# Altium footprint library PBL - THD Packages.PcbLib: 160 footprints (part 3 of 10)
Each footprint in its own frame and in the unit in brackets; x right, y up, seen from the top. Pads: shape width x height; smd on the part's side, far side on the other; paste and mask are expansions set on the pad; w line width, h text height; cw(c..) or ccw(c..) is an arc to the next point about the centre after c.
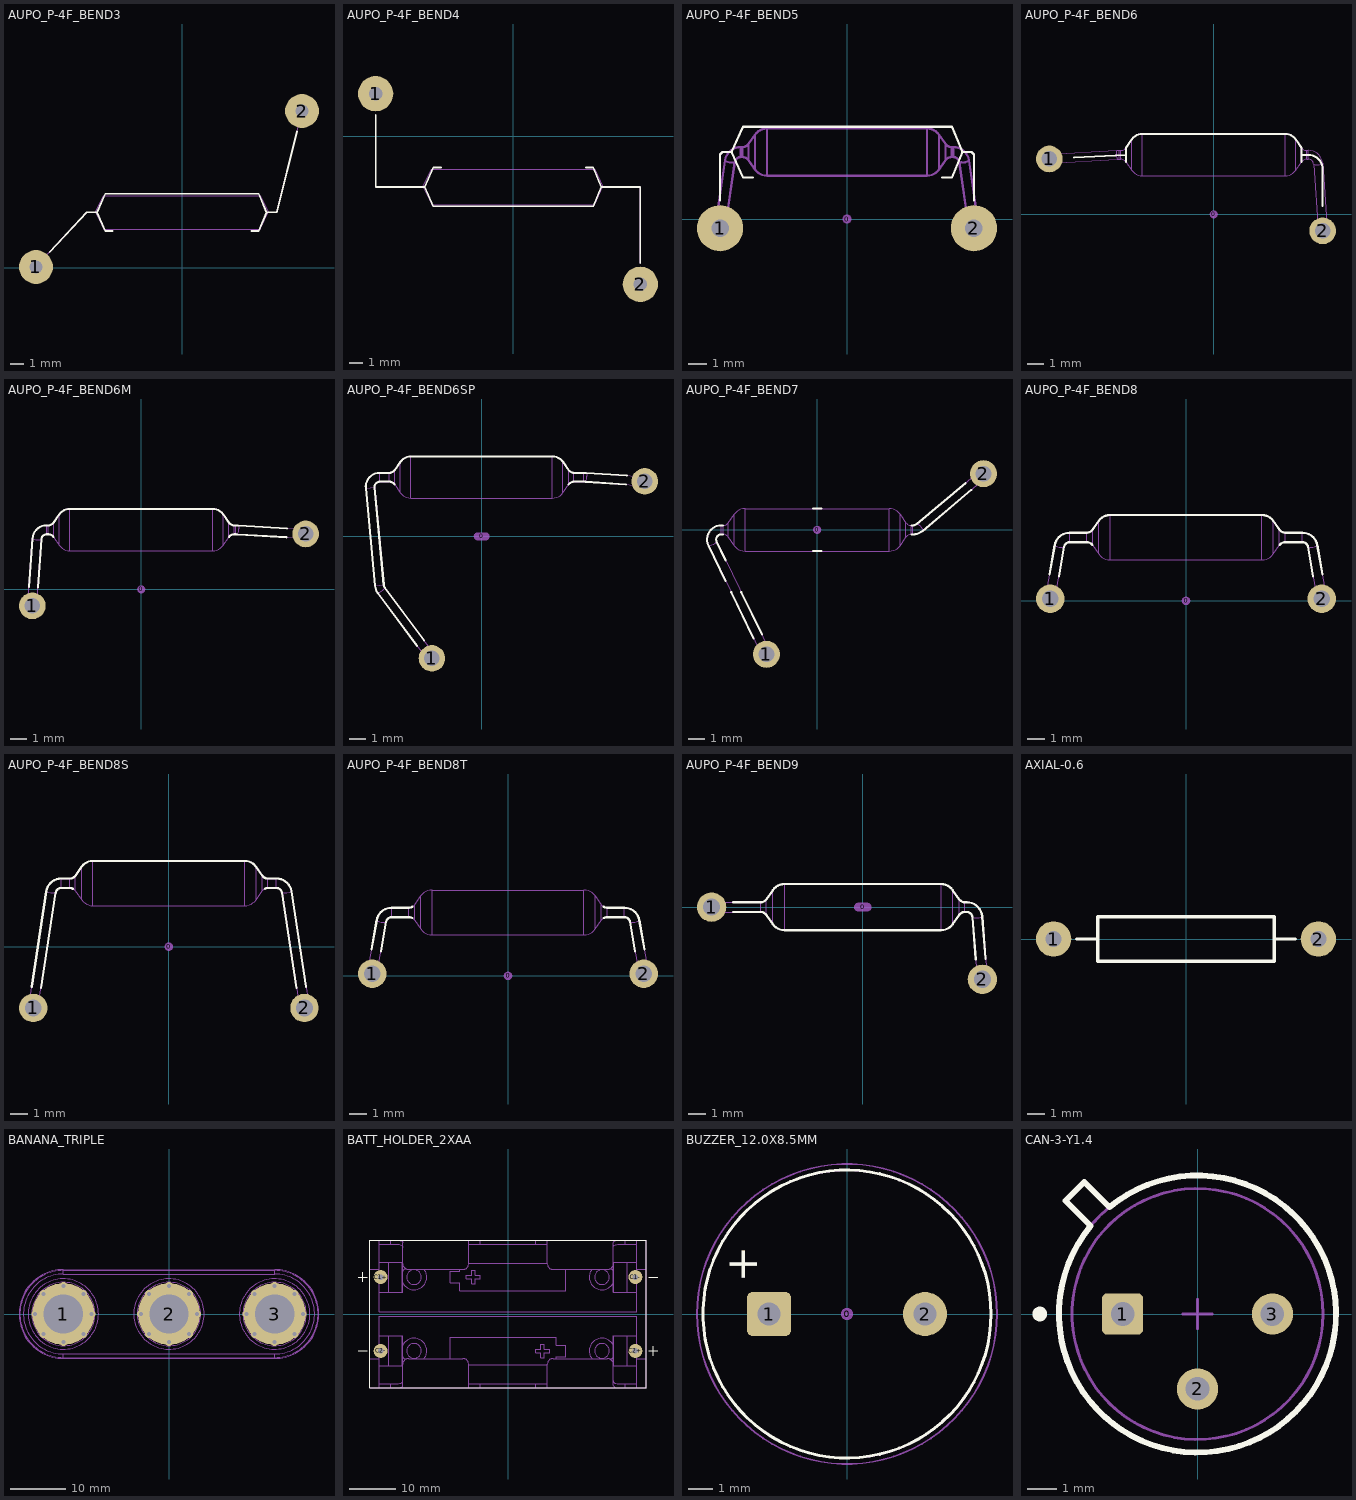
[diagram p2: the footprints below, top view; thin cyan lines are the x and y axes]

## AUPO_P-4F_BEND3 [mil] "Aupo P-4F TCO for positioning on IC legs"
height 100
pads (2):
  round 100 hole 38: 1(-431,3) 2(354,463)
Top Overlay:
  lines w5: -389.97,47.04 -281,164 -251,164 ; -205,109 -226.33,109 -251,164 ; 205,109 226.41,109 249,164 ; 338.95,403.01 279,164 249,164 ; -251,164 -226.38,219 226.38,219 249,164
13 - 3D Top Side:
  lines w3: -431,3 -280.63,164.37 -256,164.37 -231.3,213.8 231.3,213.8 254,164.37 278.63,164.37 354,463 ; -256,163.9 -231.3,114 231.3,114 254,163.9
3D body: height 105.02, standoff -94.88, extent -440.35,-6.96 364.65,473.01

## AUPO_P-4F_BEND4 [mil] "Aupo P-4F TCO for positioning on IC legs"
height 100
pads (2):
  round 100 hole 38: 1(-390,120) 2(360,-420)
Top Overlay:
  lines w5: -390,60 -390,-144 -251,-144 ; -226.38,-199 226.38,-199 249,-144 ; -226.38,-89 -251,-144 ; -226.33,-199 -251,-144 ; -226.33,-89 -205,-89 ; 205,-89 226.41,-89 249,-144 ; 360,-360 360,-144 249,-144
13 - 3D Top Side:
  lines w3: -390,60 -390,-144 -256,-144 ; -256,-144.1 -231.3,-194 231.3,-194 254,-144.1 ; -256,-143.63 -231.3,-94.2 231.3,-94.2 254,-143.63 ; 254,-144 360,-144 360,-360
3D body: height 105.02, standoff -94.88, extent -399.95,-430.6 369.97,129.36

## AUPO_P-4F_BEND5 [mil] "Aupo P-4F TCO for positioning on IC legs"
height 100
pads (3):
  round 19.68 on Mech15: 0(0,0)
  round 100 hole 38: 1(-275,-20) 2(275,-20)
Top Overlay:
  lines w5: -275,40 -275,140 -270,145 -250,145 ; -204,90 -225.33,90 -250,145 ; 206,90 227.41,90 250,145 ; 275,40 275,140 270,145 250,145 ; -250,145 -225.38,200 227.38,200 250,145
13 - 3D Top Side:
  lines w5: -282.92,0.59 ccw(c-269.19,19.56) -261.5,-2.55 ; 261.5,-2.55 ccw(c268.97,22.97) 282.85,0.28 282.92,0.59 ; -264.41,126.68 ccw(c-250.67,145.69) -242.98,123.53 ; -264.41,126.68 cw(c-230.49,121.52) -230.32,155.83 ; -264.41,126.68 -285.71,-18.43 ccw(c-275,-20) -264.29,-21.57 -242.98,123.54 ; -242.98,123.54 cw(c-230.48,121.51) -230.32,134.17 ; -230.32,134.17 -230.32,155.83 ; -230.32,134.17 -226.38,134.17 ; -230.32,155.83 -226.38,155.83 ; -226.38,134.17 cw(c-226.38,118.43) -213.48,127.46 ; -226.38,134.17 -226.38,155.83 ; -226.38,155.83 ccw(c-226.38,171.57) -213.48,162.54 ; -213.48,127.46 -213.48,162.54 ; -213.48,127.46 -199.33,107.25 ; -213.48,162.54 -199.33,182.75 ; -199.33,107.25 ccw(c-173.53,125.31) -173.53,93.82 ; -199.33,107.25 -199.33,182.75 ; -199.33,182.75 cw(c-173.53,164.69) -173.53,196.18 ; -173.53,93.82 -173.53,196.18 ; -173.53,93.82 173.53,93.82 ; -173.53,196.18 173.53,196.18 ; 173.53,93.82 ccw(c173.53,125.31) 199.33,107.25 ; 173.53,93.82 173.53,196.18 ; 173.53,196.18 cw(c173.53,164.69) 199.33,182.75 ; 199.33,107.25 199.33,182.75 ; 199.33,107.25 213.48,127.46 ; 199.33,182.75 213.48,162.54 ; 213.48,127.46 cw(c226.38,118.43) 226.38,134.17 ; 213.48,127.46 213.48,162.54 ; 213.48,162.54 ccw(c226.38,171.57) 226.38,155.83 ; 226.38,134.17 226.38,155.83 ; 226.38,134.17 230.32,134.17 ; 226.38,155.83 230.32,155.83 ; 230.32,134.17 cw(c230.48,121.51) 242.98,123.54 ; 230.32,134.17 230.32,155.83 ; 230.32,155.83 cw(c230.49,121.51) 264.41,126.68 ; 242.98,123.54 ccw(c250.45,149.1) 264.34,126.38 264.41,126.68 ; 242.98,123.54 264.29,-21.57 ccw(c275,-20) 285.83,-20 285.71,-18.43 264.41,126.68
3D body: height 102.36, standoff -100, extent -285.73,-30.8 285.83,196.09

## AUPO_P-4F_BEND6 [mil] "Aupo P-4F TCO for positioning on IC legs"
height 100
pads (3):
  round 19.68 on Mech15: 0(0,0)
  round 65 / inner round 65 / far side round 90 hole 38: 1(-400,135) 2(265,-40)
Top Overlay:
  lines w5: -340.17,138.21 -213.48,145 ; -213.48,127.46 -213.48,162.54 -199.33,182.75 cw(c-173.53,164.69) -173.53,196.18 173.53,196.18 cw(c173.53,164.69) 199.33,182.75 213.48,162.54 213.48,127.46 ; 213.48,145 230,145 cw(c230,110) 265,110 265,20
13 - 3D Top Side:
  lines w1.97: -381.43,146.96 ccw(c-359.97,137.39) -380.14,125.34 ; 252.86,-21.08 ccw(c262.11,4.31) 274.45,-19.73 274.46,-19.61 ; -235.55,155.67 ccw(c-214.1,146.11) -234.26,134.06 ; -235.55,155.67 -400.65,145.81 ccw(c-400,135) -399.35,124.19 -234.26,134.06 ; -235.55,155.67 -232.3,155.8 -230.32,155.83 ; -234.26,134.06 -232.78,134.13 -230.32,134.17 ; -230.32,134.17 -230.32,155.83 ; -230.32,134.17 -226.38,134.17 ; -230.32,155.83 -226.38,155.83 ; -226.38,134.17 cw(c-226.38,118.43) -213.48,127.46 ; -226.38,134.17 -226.38,155.83 ; -226.38,155.83 ccw(c-226.38,171.57) -213.48,162.54 ; -213.48,127.46 -199.33,107.25 ; -213.48,127.46 -213.48,162.54 ; -213.48,162.54 -199.33,182.75 ; -199.33,107.25 ccw(c-173.53,125.31) -173.53,93.82 ; -199.33,107.25 -199.33,182.75 ; -199.33,182.75 cw(c-173.53,164.69) -173.53,196.18 ; -173.53,93.82 -173.53,196.18 ; -173.53,93.82 173.53,93.82 ; -173.53,196.18 173.53,196.18 ; 173.53,93.82 ccw(c173.53,125.31) 199.33,107.25 ; 173.53,93.82 173.53,196.18 ; 173.53,196.18 cw(c173.53,164.69) 199.33,182.75 ; 199.33,107.25 199.33,182.75 ; 199.33,107.25 213.48,127.46 ; 199.33,182.75 213.48,162.54 ; 213.48,127.46 cw(c226.38,118.43) 226.38,134.17 ; 213.48,127.46 213.48,162.54 ; 213.48,162.54 ccw(c226.38,171.57) 226.38,155.83 ; 226.38,134.17 226.38,155.83 ; 226.38,134.17 230.32,134.17 ; 226.38,155.83 230.32,155.83 ; 230.32,134.17 cw(c230.47,121.52) 243.08,122.53 ; 230.32,134.17 230.32,155.83 ; 230.32,155.83 cw(c230.46,121.51) 264.69,124 ; 243.08,122.53 ccw(c252.33,147.93) 264.67,123.88 264.69,124 ; 243.08,122.53 254.2,-40.74 ccw(c265,-40) 275.83,-40 275.8,-39.26 264.69,124
3D body: height 40, standoff 0, extent -445,90.09 -355.36,179.91
3D body: height 102.87, standoff -99.49, extent -410.74,-50.8 275.83,196.09
3D body: height 40, standoff 0, extent 219.99,-84.91 309.64,4.91

## AUPO_P-4F_BEND6M [mil] "Aupo P-4F TCO for positioning on IC legs"
height 100
pads (3):
  round 19.68 on Mech15: 0(0,0)
  round 65 / inner round 65 / far side round 90 hole 38: 1(-265,-40) 2(400,135)
Top Overlay:
  lines w5: -272.66,6.54 -264.69,124.01 cw(c-230.48,121.53) -230.32,155.83 -226.38,155.83 ccw(c-226.38,171.57) -213.48,162.54 -199.33,182.75 cw(c-173.53,164.69) -173.53,196.18 173.53,196.18 cw(c173.53,164.69) 199.33,182.75 213.48,162.54 ccw(c226.38,171.57) 226.38,155.83 230.32,155.83 233.67,155.76 235.64,155.67 354.91,148.54 ; -251.05,5.07 -243.08,122.54 cw(c-230.46,121.51) -230.32,134.17 -226.38,134.17 cw(c-226.38,118.43) -213.48,127.46 ; 213.48,127.46 cw(c226.38,118.43) 226.38,134.17 230.32,134.17 231.82,134.16 234.34,134.05 353.62,126.93
13 - 3D Top Side:
  lines w1.97: -274.43,-19.69 ccw(c-262.06,2.73) -252.83,-21.16 ; 380.23,125.34 ccw(c367.39,134.41) 382.95,136.67 383.02,139.06 382.98,141.3 382.83,143.28 382.58,144.91 382.25,146.1 381.85,146.78 381.52,146.95 ; -264.69,124.01 ccw(c-252.3,146.47) -243.08,122.54 ; -264.69,124.01 cw(c-230.48,121.53) -230.32,155.83 ; -264.69,124.01 -275.76,-39.27 ccw(c-264.96,-40) -254.16,-40.73 -243.08,122.54 ; -243.08,122.54 cw(c-230.46,121.51) -230.32,134.17 ; -230.32,134.17 -230.32,155.83 ; -230.32,134.17 -226.38,134.17 ; -230.32,155.83 -226.38,155.83 ; -226.38,134.17 cw(c-226.38,118.43) -213.48,127.46 ; -226.38,134.17 -226.38,155.83 ; -226.38,155.83 ccw(c-226.38,171.57) -213.48,162.54 ; -213.48,127.46 -213.48,162.54 ; -213.48,127.46 -199.33,107.25 ; -213.48,162.54 -199.33,182.75 ; -199.33,107.25 ccw(c-173.53,125.31) -173.53,93.82 ; -199.33,107.25 -199.33,182.75 ; -199.33,182.75 cw(c-173.53,164.69) -173.53,196.18 ; -173.53,93.82 -173.53,196.18 ; -173.53,93.82 173.53,93.82 ; -173.53,196.18 173.53,196.18 ; 173.53,93.82 ccw(c173.53,125.31) 199.33,107.25 ; 173.53,93.82 173.53,196.18 ; 173.53,196.18 cw(c173.53,164.69) 199.33,182.75 ; 199.33,107.25 199.33,182.75 ; 199.33,107.25 213.48,127.46 ; 199.33,182.75 213.48,162.54 ; 213.48,127.46 cw(c226.38,118.43) 226.38,134.17 ; 213.48,127.46 213.48,162.54 ; 213.48,162.54 ccw(c226.38,171.57) 226.38,155.83 ; 226.38,134.17 226.38,155.83 ; 226.38,134.17 230.32,134.17 ; 226.38,155.83 230.32,155.83 ; 230.32,134.17 230.32,155.83 ; 230.32,134.17 231.82,134.16 234.34,134.05 ; 230.32,155.83 233.67,155.76 235.64,155.67 ; 234.34,134.05 ccw(c221.51,143.13) 237.07,145.38 237.13,147.77 237.09,150.02 236.94,152 236.69,153.63 236.36,154.82 235.96,155.5 235.64,155.67 ; 234.34,134.05 399.35,124.19 ccw(c400,135) 400.65,145.81 235.64,155.67
3D body: height 40, standoff 0, extent -309.64,-84.91 -220,4.92
3D body: height 102.95, standoff -100, extent -275.7,-50.8 410.83,196.09
3D body: height 40, standoff 0, extent 355.36,90.1 445,179.92

## AUPO_P-4F_BEND6SP [mil] "Aupo P-4F TCO for positioning on IC legs"
height 100
pads (3):
  oval 39.37x19.68 on Mech15: 0(0,0)
  round 65 / inner round 65 / far side round 90 hole 38: 1(-122.05,-299.21) 2(400,135)
Top Overlay:
  lines w5: -213.48,127.46 ccw(c-226.38,118.43) -226.38,134.17 -250,134.17 ccw(c-250,121.38) -262.74,120.18 -240.21,-119.23 ccw(c-226.81,-118) -237.62,-126.01 -141.14,-255.47 ; -158.51,-268.41 -254.99,-138.95 cw(c-226.81,-118) -261.77,-121.26 -284.3,118.15 cw(c-250,121.38) -250,155.83 -226.38,155.83 ccw(c-226.38,171.57) -213.48,162.54 -199.33,182.75 cw(c-173.53,164.69) -173.53,196.18 173.53,196.18 cw(c173.53,164.69) 199.33,182.75 213.48,162.54 ccw(c226.38,171.57) 226.38,155.83 250,155.83 253.99,155.74 256.09,155.62 355.88,148.85 ; 213.48,127.46 cw(c226.38,118.43) 226.38,134.17 250,134.17 251.63,134.15 254.63,134.02 354.42,127.24
13 - 3D Top Side:
  lines w1.97: -142.8,-289.48 ccw(c-154.49,-254.64) -126.6,-278.57 -125.76,-277.53 -125.4,-276.81 -125.44,-276.54 ; 380.81,125.45 ccw(c367.01,135.36) 383.94,136.83 384,139.39 383.93,141.77 383.72,143.84 383.38,145.46 382.93,146.54 382.4,147.03 382.28,147.05 ; -284.3,118.15 cw(c-250,121.38) -250,155.83 ; -284.3,118.15 -261.77,-121.26 ; -284.3,118.15 -262.74,120.18 ; -262.74,120.18 cw(c-250,121.38) -250,134.17 ; -262.74,120.18 -240.21,-119.23 ; -261.77,-121.26 ccw(c-226.81,-118) -254.99,-138.95 ; -261.77,-121.26 -240.21,-119.23 ; -254.99,-138.95 ccw(c-266.66,-104.11) -238.78,-128.04 -237.94,-127 -237.58,-126.28 -237.62,-126.01 ; -254.99,-138.95 -130.73,-305.68 ccw(c-122.05,-299.21) -113.37,-292.74 -237.62,-126.01 ; -250,134.17 -226.38,134.17 ; -250,134.17 -250,155.83 ; -250,155.83 -226.38,155.83 ; -240.21,-119.23 ccw(c-226.81,-118) -237.62,-126.01 ; -226.38,134.17 cw(c-226.38,118.43) -213.48,127.46 ; -226.38,134.17 -226.38,155.83 ; -226.38,155.83 ccw(c-226.38,171.57) -213.48,162.54 ; -213.48,127.46 -199.33,107.25 ; -213.48,127.46 -213.48,162.54 ; -213.48,162.54 -199.33,182.75 ; -199.33,107.25 ccw(c-173.53,125.31) -173.53,93.82 ; -199.33,107.25 -199.33,182.75 ; -199.33,182.75 cw(c-173.53,164.69) -173.53,196.18 ; -173.53,93.82 173.53,93.82 ; -173.53,93.82 -173.53,196.18 ; -173.53,196.18 173.53,196.18 ; 173.53,93.82 ccw(c173.53,125.31) 199.33,107.25 ; 173.53,93.82 173.53,196.18 ; 173.53,196.18 cw(c173.53,164.69) 199.33,182.75 ; 199.33,107.25 213.48,127.46 ; 199.33,107.25 199.33,182.75 ; 199.33,182.75 213.48,162.54 ; 213.48,127.46 cw(c226.38,118.43) 226.38,134.17 ; 213.48,127.46 213.48,162.54 ; 213.48,162.54 ccw(c226.38,171.57) 226.38,155.83 ; 226.38,134.17 250,134.17 ; 226.38,134.17 226.38,155.83 ; 226.38,155.83 250,155.83 ; 250,134.17 251.63,134.15 254.63,134.02 ; 250,134.17 250,155.83 ; 250,155.83 253.99,155.74 256.09,155.62 ; 254.63,134.02 ccw(c240.84,143.92) 257.75,145.39 257.82,147.96 257.74,150.34 257.53,152.4 257.19,154.02 256.74,155.11 256.22,155.6 256.09,155.62 ; 254.63,134.02 399.27,124.2 ccw(c400,135) 400.73,145.8 256.09,155.62
3D body: height 40, standoff 0, extent -166.69,-344.12 -77.04,-254.29
3D body: height 102.95, standoff -100, extent -284.29,-310.01 410.83,196.09
3D body: height 40, standoff 0, extent 355.36,90.1 445,179.92

## AUPO_P-4F_BEND7 [mil] "Aupo P-4F TCO for positioning on IC legs"
height 100
pads (3):
  round 19.68 on Mech15: 0(0,0)
  round 65 / inner round 65 / far side round 90 hole 38: 1(-122.05,-299.21) 2(400,135)
Top Overlay:
  lines w5: -226.38,-10.83 -230.32,-10.83 ccw(c-230.71,-23.12) -241.92,-28.19 -220,-73.23 ; -226.38,10.83 -230.32,10.83 ccw(c-230.77,-23.09) -261.39,-37.67 -220,-122.7 ; -206.71,-150 -152.67,-261.03 ; -182.63,-150 -133.2,-251.56 ; -10,-51.18 10,-51.18 ; -10,51.18 10,51.18 ; 226.38,-10.83 230.32,-10.83 ccw(c230.57,25.09) 253.54,-2.52 370.8,96.25 ; 226.38,10.83 230.32,10.83 ccw(c230.51,25.26) 239.59,14.04 356.85,112.81
13 - 3D Top Side:
  lines w1.97: -140.07,-286.92 ccw(c-140.58,-259.77) -121.17,-278.77 -120.63,-277.98 -120.6,-277.44 ; 380.65,132.86 381.22,133.11 382.26,133.05 383.6,132.53 385.15,131.57 386.84,130.24 388.57,128.61 390.25,126.76 391.78,124.79 393.1,122.81 394.11,120.92 394.78,119.23 395.06,117.83 394.95,116.8 394.6,116.3 ; -261.39,-37.67 ccw(c-261.89,-10.52) -242.49,-29.52 -241.95,-28.73 -241.91,-28.2 ; -261.39,-37.67 cw(c-230.77,-23.09) -230.32,10.83 ; -261.39,-37.67 -131.78,-303.95 ccw(c-122.05,-299.21) -111.22,-299.21 -111.51,-296.72 -112.31,-294.47 -241.92,-28.19 ; -241.92,-28.19 cw(c-230.71,-23.12) -230.32,-10.83 ; -230.32,-10.83 -230.32,10.83 ; -230.32,-10.83 -226.38,-10.83 ; -230.32,10.83 -226.38,10.83 ; -226.38,-10.83 cw(c-226.38,-26.57) -213.48,-17.54 ; -226.38,-10.83 -226.38,10.83 ; -226.38,10.83 ccw(c-226.38,26.57) -213.48,17.54 ; -213.48,-17.54 -213.48,17.54 ; -213.48,-17.54 -199.33,-37.75 ; -213.48,17.54 -199.33,37.75 ; -199.33,-37.75 ccw(c-173.53,-19.69) -173.53,-51.18 ; -199.33,-37.75 -199.33,37.75 ; -199.33,37.75 cw(c-173.53,19.69) -173.53,51.18 ; -173.53,-51.18 -173.53,51.18 ; -173.53,-51.18 173.53,-51.18 ; -173.53,51.18 173.53,51.18 ; 173.53,-51.18 ccw(c173.53,-19.68) 199.33,-37.75 ; 173.53,-51.18 173.53,51.18 ; 173.53,51.18 cw(c173.53,19.69) 199.33,37.75 ; 199.33,-37.75 199.33,37.75 ; 199.33,-37.75 213.48,-17.54 ; 199.33,37.75 213.48,17.54 ; 213.48,-17.54 cw(c226.38,-26.57) 226.38,-10.83 ; 213.48,-17.54 213.48,17.54 ; 213.48,17.54 ccw(c226.38,26.57) 226.38,10.83 ; 226.38,-10.83 226.38,10.83 ; 226.38,-10.83 230.32,-10.83 ; 226.38,10.83 230.32,10.83 ; 230.32,-10.83 ccw(c230.57,25.09) 253.54,-2.52 ; 230.32,-10.83 230.32,10.83 ; 230.32,10.83 ccw(c230.51,25.26) 239.59,14.04 ; 239.59,14.04 393.03,143.28 cw(c400,135) 406.98,126.72 253.54,-2.52 ; 239.59,14.04 240.15,14.29 241.2,14.23 242.54,13.7 244.09,12.75 245.78,11.42 247.51,9.79 249.19,7.94 250.72,5.97 252.03,3.99 253.05,2.1 253.72,0.41 254,-0.99 253.88,-2.02 253.54,-2.52
3D body: height 40, standoff 0, extent 355.36,90.1 445,179.92
3D body: height 137.8, standoff -100, extent -264.69,-310.01 410.83,145.81
3D body: height 40, standoff 0, extent -166.69,-344.12 -77.04,-254.29

## AUPO_P-4F_BEND8 [mil] "Aupo P-4F TCO for positioning on IC legs"
height 100
pads (3):
  round 19.68 on Mech15: 0(0,0)
  round 65 / inner round 65 / far side round 90 hole 38: 1(-310,5) 2(310,5)
Top Overlay:
  lines w5: -311.41,60.24 -299.71,127.69 cw(c-266,121.56) -265.75,155.83 -226.38,155.83 ccw(c-226.38,171.57) -213.48,162.54 -199.33,182.75 cw(c-173.53,164.69) -173.53,196.18 173.53,196.18 cw(c173.53,164.69) 199.33,182.75 213.48,162.54 ccw(c226.38,171.57) 226.38,155.83 265.75,155.83 cw(c265.99,121.56) 299.71,127.69 311.41,60.24 ; -290.07,56.54 -278.37,123.99 cw(c-265.97,121.53) -265.75,134.17 -226.38,134.17 cw(c-226.38,118.43) -213.48,127.46 ; 213.48,127.46 cw(c226.38,118.43) 226.38,134.17 265.75,134.17 cw(c266,121.57) 278.37,123.99 290.07,56.54
13 - 3D Top Side:
  lines w1.97: -317.54,24.86 -317.55,24.7 -317.24,24.12 -316.45,23.48 -315.22,22.83 -313.59,22.18 -311.65,21.57 -309.48,21.03 -307.2,20.58 -304.9,20.24 -302.69,20.03 -300.67,19.97 -298.95,20.04 -297.6,20.25 -296.68,20.6 -296.24,21.05 -296.21,21.16 ; -299.62,127.25 ccw(c-286.09,144.54) -278.37,123.99 ; 296.21,21.16 ccw(c303.94,41.66) 317.46,24.42 317.54,24.86 ; 299.62,127.25 cw(c286.09,144.54) 278.37,123.99 ; -278.37,123.99 cw(c-265.97,121.53) -265.75,134.17 ; -278.37,123.99 -299.33,3.15 cw(c-310,5) -320.67,6.85 -299.71,127.69 cw(c-266,121.56) -265.75,155.83 ; -265.75,134.17 -226.38,134.17 ; -265.75,134.17 -265.75,155.83 ; -265.75,155.83 -226.38,155.83 ; -226.38,134.17 cw(c-226.38,118.43) -213.48,127.46 ; -226.38,134.17 -226.38,155.83 ; -226.38,155.83 ccw(c-226.38,171.57) -213.48,162.54 ; -213.48,127.46 -199.33,107.25 ; -213.48,127.46 -213.48,162.54 ; -213.48,162.54 -199.33,182.75 ; -199.33,107.25 ccw(c-173.53,125.31) -173.53,93.82 ; -199.33,107.25 -199.33,182.75 ; -199.33,182.75 cw(c-173.53,164.69) -173.53,196.18 ; -173.53,93.82 173.53,93.82 ; -173.53,93.82 -173.53,196.18 ; -173.53,196.18 173.53,196.18 ; 173.53,93.82 ccw(c173.53,125.31) 199.33,107.25 ; 173.53,93.82 173.53,196.18 ; 173.53,196.18 cw(c173.53,164.69) 199.33,182.75 ; 199.33,107.25 213.48,127.46 ; 199.33,107.25 199.33,182.75 ; 199.33,182.75 213.48,162.54 ; 213.48,127.46 cw(c226.38,118.43) 226.38,134.17 ; 213.48,127.46 213.48,162.54 ; 213.48,162.54 ccw(c226.38,171.57) 226.38,155.83 ; 226.38,134.17 265.75,134.17 ; 226.38,134.17 226.38,155.83 ; 226.38,155.83 265.75,155.83 ; 265.75,134.17 cw(c266,121.57) 278.37,123.99 ; 265.75,134.17 265.75,155.83 ; 265.75,155.83 cw(c265.99,121.56) 299.71,127.69 320.67,6.85 320.83,5 cw(c310,5) 299.33,3.15 278.37,123.99
3D body: height 40, standoff 0, extent -354.64,-39.9 -265,49.92
3D body: height 104.95, standoff -98, extent -320.74,-5.8 320.83,196.09
3D body: height 40, standoff 0, extent 265.36,-39.9 355,49.92

## AUPO_P-4F_BEND8S [mil] "Aupo P-4F TCO for positioning beside FETs"
height 133.86
pads (3):
  round 19.68 on Mech15: 0(0,0)
  round 65 / inner round 65 / far side round 90 hole 38: 1(-310,-140) 2(310,-140)
Top Overlay:
  lines w5: -313.51,-91.4 -280.12,126.69 cw(c-246.12,121.42) -246.06,155.83 -226.38,155.83 ccw(c-226.38,171.57) -213.48,162.54 -199.33,182.75 cw(c-173.53,164.69) -173.53,196.18 173.53,196.18 cw(c173.53,164.69) 199.33,182.75 213.48,162.54 ccw(c226.38,171.57) 226.38,155.83 246.06,155.83 cw(c246.12,121.42) 280.12,126.69 313.51,-91.4 ; -292.11,-94.68 -258.71,123.41 cw(c-246.11,121.41) -246.06,134.17 -226.38,134.17 cw(c-226.38,118.43) -219.72,132.7 ; 219.72,132.7 cw(c226.38,118.43) 226.38,134.17 246.06,134.17 cw(c246.11,121.41) 258.71,123.41 292.11,-94.68
13 - 3D Top Side:
  lines w1.97: -317.5,-117.47 ccw(c-301.1,-81.89) -296.1,-120.75 ; 296.1,-120.75 ccw(c300.88,-78.69) 317.41,-117.66 317.5,-117.47 ; -280.12,126.69 cw(c-246.12,121.42) -246.06,155.83 ; -280.12,126.69 ccw(c-263.71,162.32) -258.71,123.41 ; -280.12,126.69 -320.7,-138.36 ccw(c-310,-140) -299.3,-141.64 -258.71,123.41 ; -258.71,123.41 cw(c-246.11,121.41) -246.06,134.17 ; -246.06,134.17 -226.38,134.17 ; -246.06,134.17 -246.06,155.83 ; -246.06,155.83 -226.38,155.83 ; -226.38,134.17 cw(c-226.38,118.43) -213.48,127.46 ; -226.38,134.17 -226.38,155.83 ; -226.38,155.83 ccw(c-226.38,171.57) -213.48,162.54 ; -213.48,127.46 -199.33,107.25 ; -213.48,127.46 -213.48,162.54 ; -213.48,162.54 -199.33,182.75 ; -199.33,107.25 ccw(c-173.53,125.31) -173.53,93.82 ; -199.33,107.25 -199.33,182.75 ; -199.33,182.75 cw(c-173.53,164.69) -173.53,196.18 ; -173.53,93.82 173.53,93.82 ; -173.53,93.82 -173.53,196.18 ; -173.53,196.18 173.53,196.18 ; 173.53,93.82 ccw(c173.53,125.31) 199.33,107.25 ; 173.53,93.82 173.53,196.18 ; 173.53,196.18 cw(c173.53,164.69) 199.33,182.75 ; 199.33,107.25 213.48,127.46 ; 199.33,107.25 199.33,182.75 ; 199.33,182.75 213.48,162.54 ; 213.48,127.46 cw(c226.38,118.43) 226.38,134.17 ; 213.48,127.46 213.48,162.54 ; 213.48,162.54 ccw(c226.38,171.57) 226.38,155.83 ; 226.38,134.17 246.06,134.17 ; 226.38,134.17 226.38,155.83 ; 226.38,155.83 246.06,155.83 ; 246.06,134.17 cw(c246.12,121.43) 258.71,123.41 ; 246.06,134.17 246.06,155.83 ; 246.06,155.83 cw(c246.12,121.42) 280.12,126.69 ; 258.71,123.41 ccw(c263.49,165.49) 280.02,126.5 280.12,126.69 ; 258.71,123.41 299.3,-141.64 ccw(c310,-140) 320.83,-140 320.7,-138.36 280.12,126.69
3D body: height 40, standoff 0, extent 265.36,-184.9 355,-95.08
3D body: height 102.95, standoff -100, extent -320.74,-150.8 320.83,196.09
3D body: height 40, standoff 0, extent -354.64,-184.9 -265,-95.08

## AUPO_P-4F_BEND8T [mil] "Aupo P-4F TCO for positioning on top of FETs"
height 133.86
pads (3):
  round 19.68 on Mech15: 0(0,0)
  round 65 / inner round 65 / far side round 90 hole 38: 1(-310,5) 2(310,5)
Top Overlay:
  lines w5: -311.41,60.24 -299.71,127.69 cw(c-266,121.56) -265.75,155.83 -226.38,155.83 ccw(c-226.38,171.57) -218.5,157.94 ; -290.07,56.54 -278.37,123.99 cw(c-265.97,121.53) -265.75,134.17 -226.38,134.17 cw(c-226.38,118.43) -218.5,132.06 ; 218.5,132.06 cw(c226.38,118.43) 226.38,134.17 265.75,134.17 cw(c266,121.57) 278.37,123.99 290.07,56.54 ; 218.5,157.94 ccw(c226.38,171.57) 226.38,155.83 265.75,155.83 cw(c265.99,121.56) 299.71,127.69 311.41,60.24
13 - 3D Top Side:
  lines w1.97: -317.54,24.86 -317.55,24.7 -317.24,24.12 -316.45,23.48 -315.22,22.83 -313.59,22.18 -311.65,21.57 -309.48,21.03 -307.2,20.58 -304.9,20.24 -302.69,20.03 -300.67,19.97 -298.95,20.04 -297.6,20.25 -296.68,20.6 -296.24,21.05 -296.21,21.16 ; -299.62,127.25 ccw(c-286.09,144.54) -278.37,123.99 ; 296.21,21.16 ccw(c303.94,41.66) 317.46,24.42 317.54,24.86 ; 299.62,127.25 cw(c286.09,144.54) 278.37,123.99 ; -278.37,123.99 cw(c-265.97,121.53) -265.75,134.17 ; -278.37,123.99 -299.33,3.15 cw(c-310,5) -320.67,6.85 -299.71,127.69 cw(c-266,121.56) -265.75,155.83 ; -265.75,134.17 -265.75,155.83 ; -265.75,134.17 -226.38,134.17 ; -265.75,155.83 -226.38,155.83 ; -226.38,134.17 cw(c-226.38,118.43) -213.48,127.46 ; -226.38,134.17 -226.38,155.83 ; -226.38,155.83 ccw(c-226.38,171.57) -213.48,162.54 ; -213.48,127.46 -213.48,162.54 ; -213.48,127.46 -199.33,107.25 ; -213.48,162.54 -199.33,182.75 ; -199.33,107.25 ccw(c-173.53,125.31) -173.53,93.82 ; -199.33,107.25 -199.33,182.75 ; -199.33,182.75 cw(c-173.53,164.69) -173.53,196.18 ; -173.53,93.82 -173.53,196.18 ; -173.53,93.82 173.53,93.82 ; -173.53,196.18 173.53,196.18 ; 173.53,93.82 ccw(c173.53,125.31) 199.33,107.25 ; 173.53,93.82 173.53,196.18 ; 173.53,196.18 cw(c173.53,164.69) 199.33,182.75 ; 199.33,107.25 199.33,182.75 ; 199.33,107.25 213.48,127.46 ; 199.33,182.75 213.48,162.54 ; 213.48,127.46 cw(c226.38,118.43) 226.38,134.17 ; 213.48,127.46 213.48,162.54 ; 213.48,162.54 ccw(c226.38,171.57) 226.38,155.83 ; 226.38,134.17 226.38,155.83 ; 226.38,134.17 265.75,134.17 ; 226.38,155.83 265.75,155.83 ; 265.75,134.17 cw(c266,121.57) 278.37,123.99 ; 265.75,134.17 265.75,155.83 ; 265.75,155.83 cw(c265.99,121.56) 299.71,127.69 320.67,6.85 320.83,5 cw(c310,5) 299.33,3.15 278.37,123.99
3D body: height 40, standoff 0, extent 265.36,-39.9 355,49.92
3D body: height 136.81, standoff -66.14, extent -320.74,-5.8 320.83,196.09
3D body: height 40, standoff 0, extent -354.64,-39.9 -265,49.92

## AUPO_P-4F_BEND9 [mil] "Aupo P-4F TCO for positioning on IC legs"
height 100
pads (3):
  oval 39.37x19.68 on Mech15: 0(0,0)
  round 65 / inner round 65 / far side round 90 hole 38: 1(-335,0) 2(265,-160)
Top Overlay:
  lines w5: -287.4,-10.83 -226.38,-10.83 cw(c-226.38,-26.57) -213.48,-17.54 -199.33,-37.75 ccw(c-173.53,-19.69) -173.53,-51.18 173.53,-51.18 ccw(c173.53,-19.68) 199.33,-37.75 213.48,-17.54 cw(c226.38,-26.57) 226.38,-10.83 230.32,-10.83 cw(c230.52,-23.44) 243.07,-22.2 250.57,-115.9 ; -287.4,10.83 -226.38,10.83 ccw(c-226.38,26.57) -213.48,17.54 -199.33,37.75 cw(c-173.53,19.68) -173.53,51.18 173.53,51.18 cw(c173.53,19.68) 199.33,37.75 213.48,17.54 ccw(c226.38,26.57) 226.38,10.83 230.32,10.83 cw(c230.53,-23.43) 264.66,-20.48 ; 264.64,-20.65 264.66,-20.48 ; 272.15,-114.17 264.66,-20.48
13 - 3D Top Side:
  lines w1.97: 252.66,-141.98 ccw(c261.89,-119.69) 274.22,-140.43 274.24,-140.26 ; -226.38,-10.83 cw(c-226.38,-26.57) -213.48,-17.54 ; -226.38,-10.83 -226.38,10.83 ; -226.38,-10.83 -335,-10.83 cw(c-335,0) -335,10.83 -226.38,10.83 ; -226.38,10.83 ccw(c-226.38,26.57) -213.48,17.54 ; -213.48,-17.54 -213.48,17.54 ; -213.48,-17.54 -199.33,-37.75 ; -213.48,17.54 -199.33,37.75 ; -199.33,-37.75 ccw(c-173.53,-19.69) -173.53,-51.18 ; -199.33,-37.75 -199.33,37.75 ; -199.33,37.75 cw(c-173.53,19.68) -173.53,51.18 ; -173.53,-51.18 -173.53,51.18 ; -173.53,-51.18 173.53,-51.18 ; -173.53,51.18 173.53,51.18 ; 173.53,-51.18 ccw(c173.53,-19.68) 199.33,-37.75 ; 173.53,-51.18 173.53,51.18 ; 173.53,51.18 cw(c173.53,19.68) 199.33,37.75 ; 199.33,-37.75 199.33,37.75 ; 199.33,-37.75 213.48,-17.54 ; 199.33,37.75 213.48,17.54 ; 213.48,-17.54 cw(c226.38,-26.57) 226.38,-10.83 ; 213.48,-17.54 213.48,17.54 ; 213.48,17.54 ccw(c226.38,26.57) 226.38,10.83 ; 226.38,-10.83 226.38,10.83 ; 226.38,-10.83 230.32,-10.83 cw(c230.52,-23.44) 243.07,-22.2 ; 226.38,10.83 230.32,10.83 cw(c230.53,-23.43) 264.66,-20.48 ; 243.07,-22.2 ccw(c252.3,0.13) 264.64,-20.65 264.66,-20.48 ; 243.07,-22.2 254.17,-160.86 ccw(c264.96,-160) 275.79,-160 275.75,-159.14 264.66,-20.48
3D body: height 102.95, standoff -100, extent -345.74,-170.8 275.79,51.08
3D body: height 40, standoff 0, extent 220.36,-204.9 310,-115.08
3D body: height 40, standoff 0, extent -379.64,-44.9 -289.99,44.92

## AXIAL-0.6 [mil] "Axial Device, Thru-Hole; 2 Leads; 0.6 in Pin Spacing"
height 100
pads (2):
  round 80 hole 36: 1(-300,0) 2(300,0)
Top Overlay:
  lines w7.87: -248.03,0 -200,0 ; 200,0 248.03,0 ; -200,-50 -200,50 200,50 200,-50 -200,-50
3D body: height 102.76, standoff -98.43, extent -311.8,-51.57 311.82,51.58

## BANANA_TRIPLE [mil] "Triple Banana jack, panel mount style"
height 318.9
pads (3):
  round 440 hole 280: 1(-750,0) 2(0,0) 3(750,0)
via 750,200 diameter 56 hole 28
via 608.58,141.42 diameter 56 hole 28
via 550,0 diameter 56 hole 28
via 608.58,-141.42 diameter 56 hole 28
via 750,-200 diameter 56 hole 28
via 891.42,-141.42 diameter 56 hole 28
via 950,0 diameter 56 hole 28
via 891.42,141.42 diameter 56 hole 28
via -750,200 diameter 56 hole 28
via -891.42,141.42 diameter 56 hole 28
via -950,0 diameter 56 hole 28
via -891.42,-141.42 diameter 56 hole 28
via -750,-200 diameter 56 hole 28
via -608.58,-141.42 diameter 56 hole 28
via -550,0 diameter 56 hole 28
via -608.58,141.42 diameter 56 hole 28
via 141.42,141.42 diameter 56 hole 28
via 200,0 diameter 56 hole 28
via 141.42,-141.42 diameter 56 hole 28
via 0,-200 diameter 56 hole 28
via -141.42,-141.42 diameter 56 hole 28
via -200,0 diameter 56 hole 28
via -141.42,141.42 diameter 56 hole 28
via 0,200 diameter 56 hole 28
13 - 3D Top Side:
  circle w5: c750,0 r250
  circle w5: c750,0 r83
  circle w5: c750,0 r225
  circle w5: c0,0 r250
  circle w5: c-750,0 r83
  circle w5: c0,0 r83
  circle w5: c0,0 r225
  circle w5: c-750,0 r225
  circle w5: c-750,0 r250
  lines w5: -750,-315 cw(c-750,0) -750,315 ; -750,-315 750,-315 ; -750,-315 -750,-283.94 ; -750,-283.94 cw(c-750,0) -750,283.94 ; -750,-283.94 750,-283.94 ; -750,283.94 -750,315 ; -750,283.94 750,283.94 ; -750,315 750,315 ; 750,-315 ccw(c750,0) 750,315 ; 750,-315 750,-283.94 ; 750,-283.94 ccw(c750,0) 750,283.94 ; 750,283.94 750,315 ; -750,-308.9 cw(c-750,0) -750,308.9 750,308.9 cw(c750,0) 750,-308.9 -750,-308.9
3D body: height 380, standoff -840, extent -1064.99,-314.99 1065,315

## BATT_HOLDER_2XAA [mil] "2-cell AA battery holder"
height 660
pads (4):
  round 120 hole 48: C1+(-1086.61,314.96) C1-(1086.61,314.96) C2+(1086.61,-314.96) C2-(-1086.61,-314.96)
Top Overlay:
  lines w5: -1279.53,-314.96 -1200.79,-314.96 ; -1279.53,314.96 -1200.79,314.96 ; -1240.16,275.59 -1240.16,354.33 ; 1200.79,-314.96 1279.53,-314.96 ; 1200.79,314.96 1279.53,314.96 ; 1240.16,-354.33 1240.16,-275.59
  lines w7.87: -1181.1,-629.92 -1181.1,629.92 1181.1,629.92 1181.1,-629.92 -1181.1,-629.92
13 - 3D Top Side:
  drawing of 198 lines, arcs and shapes, not listed
3D body: height 657.48, standoff -118.11, extent -1181.1,-629.91 1181.1,629.93

## BUZZER_12.0X8.5MM [mil]
height 354.33
pads (3):
  round 20 on Mech15: 0(0,0)
  rrect25% 72x72 / inner rrect25% 72x72 / far side rrect25% 90x90 hole 38: 1(-127.95,0)
  round 72 / inner round 72 / far side round 90 hole 38: 2(127.95,0)
Top Overlay:
  circle w5: c0,0 r236.22
  text "+" at -129.92,51.18 h90
13 - 3D Top Side:
  circle w3: c0.14,-0.47 r236.22
15 - Top Courtyards:
  circle w3: c0,0 r246.06
3D body: height 354.33, standoff -110.24, extent -246.02,-246.04 246.07,246.06
3D body: height 50, standoff 0, extent 83.31,-44.9 172.96,44.92
3D body: height 50, standoff 0, extent -172.59,-44.91 -82.95,44.92

## CAN-3-Y1.4 [mm] "Can; 3 Leads; Pin Circle Dia. 5.08 mm; Lead Dia. 0.48 mm (max)"
height 4.55
pads (3):
  rrect25% 1.4x1.4 hole 0.8: 1(-2.54,0)
  round 1.4 hole 0.8: 2(0,-2.54) 3(2.54,0)
Top Overlay:
  circle w0.25: c-5.35,0 r0.125
  lines w0.2: -3.626,2.99 -4.475,3.838 -3.838,4.475 -2.99,3.626 ; -3.622,2.987 ccw(c0,0) -2.987,3.622
13 - 3D Top Side:
  circle w0.1: c0,0 r4.695
  circle w0.1: c0,0 r4.255
15 - Top Courtyards:
  lines w0.1: -0.5,0 0.5,0 ; 0,-0.5 0,0.5
3D body: height 1.27, standoff 0, extent -4.705,-4.705 4.705,4.705
3D body: height 4.55, standoff 1.27, extent -4.264,-4.264 4.264,4.264